# Altium schematic symbol library TLV76750DGNR.SchLib: 1 symbol
Pins are listed as number, name and electrical type; pins without a type are passive.

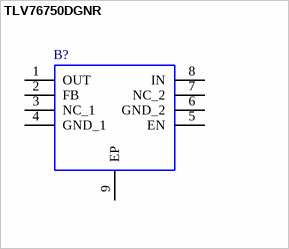
[diagram p0: symbol TLV76750DGNR]

## TLV76750DGNR
designator B?
LDO Voltage Regulators Adjustable- and fixed-output, 1-A, 16-V, positive-voltage low-dropout (LDO) linear regulator 8-HVSSOP -40 to 125; Manufacturer_Name: Texas Instruments; Geometry.Height: 1.1mm; Manufacturer_Part_Number: TLV76750DGNR; Mouser Part Number: 595-TLV76750DGNR; Mouser Price/Stock: https://www.mouser.co.uk/ProductDetail/Texas-Instruments/TLV76750DGNR?qs=QNEnbhJQKvaJEVkWGWZhnw%3D%3D; Arrow Part Number: *; Arrow Price/Stock: *; Mouser Testing Part Number: *; Mouser Testing Price/Stock: *; Datasheet Link: https://www.ti.com/lit/gpn/tlv767
footprint SOP65P490X110-9N
pins: 1 OUT, 2 FB, 3 NC_1, 4 GND_1, 5 EN, 6 GND_2, 7 NC_2, 8 IN, 9 EP